# Altium integrated library 2171750001.IntLib: 1 symbol
Pins are listed as number, name and electrical type; pins without a type are passive.

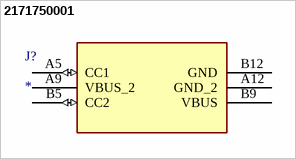
[diagram p0: symbol 2171750001]

## 2171750001
designator J?
USB-C (USB TYPE-C) USB 2.0 Receptacle Connector 24 (6+18 Dummy) Position Surface Mount, Right Angle; Through HoleÄáº§u ná»‘i á»• cáº¯m USB 2.0 USB-C (USB TYPE-C) 24 (6 + 18 giáº£) Vá»‹ trÃ­ GiÃ¡ treo bá» máº·t, gÃ³c pháº£i; ThÃ´ng qua lá»—; MF: Molex; MP: 2171750001; SnapEDA_Link: https://www.snapeda.com/parts/2171750001/Molex/view-part/?ref=snap; Package: None; Value: *; Check_prices: https://www.snapeda.com/parts/2171750001/Molex/view-part/?ref=eda
footprint 2171750001_MOL
pins: A5 CC1 (io), A9 VBUS_2 (power), A12 GND_2, B5 CC2 (io), B9 VBUS (power), B12 GND